# Altium footprint library PcbLib_IDC_Tester_v1.PcbLib: 13 footprints
Each footprint in its own frame and in the unit in brackets; x right, y up, seen from the top. Pads: shape width x height; smd on the part's side, far side on the other; paste and mask are expansions set on the pad; w line width, h text height; cw(c..) or ccw(c..) is an arc to the next point about the centre after c.
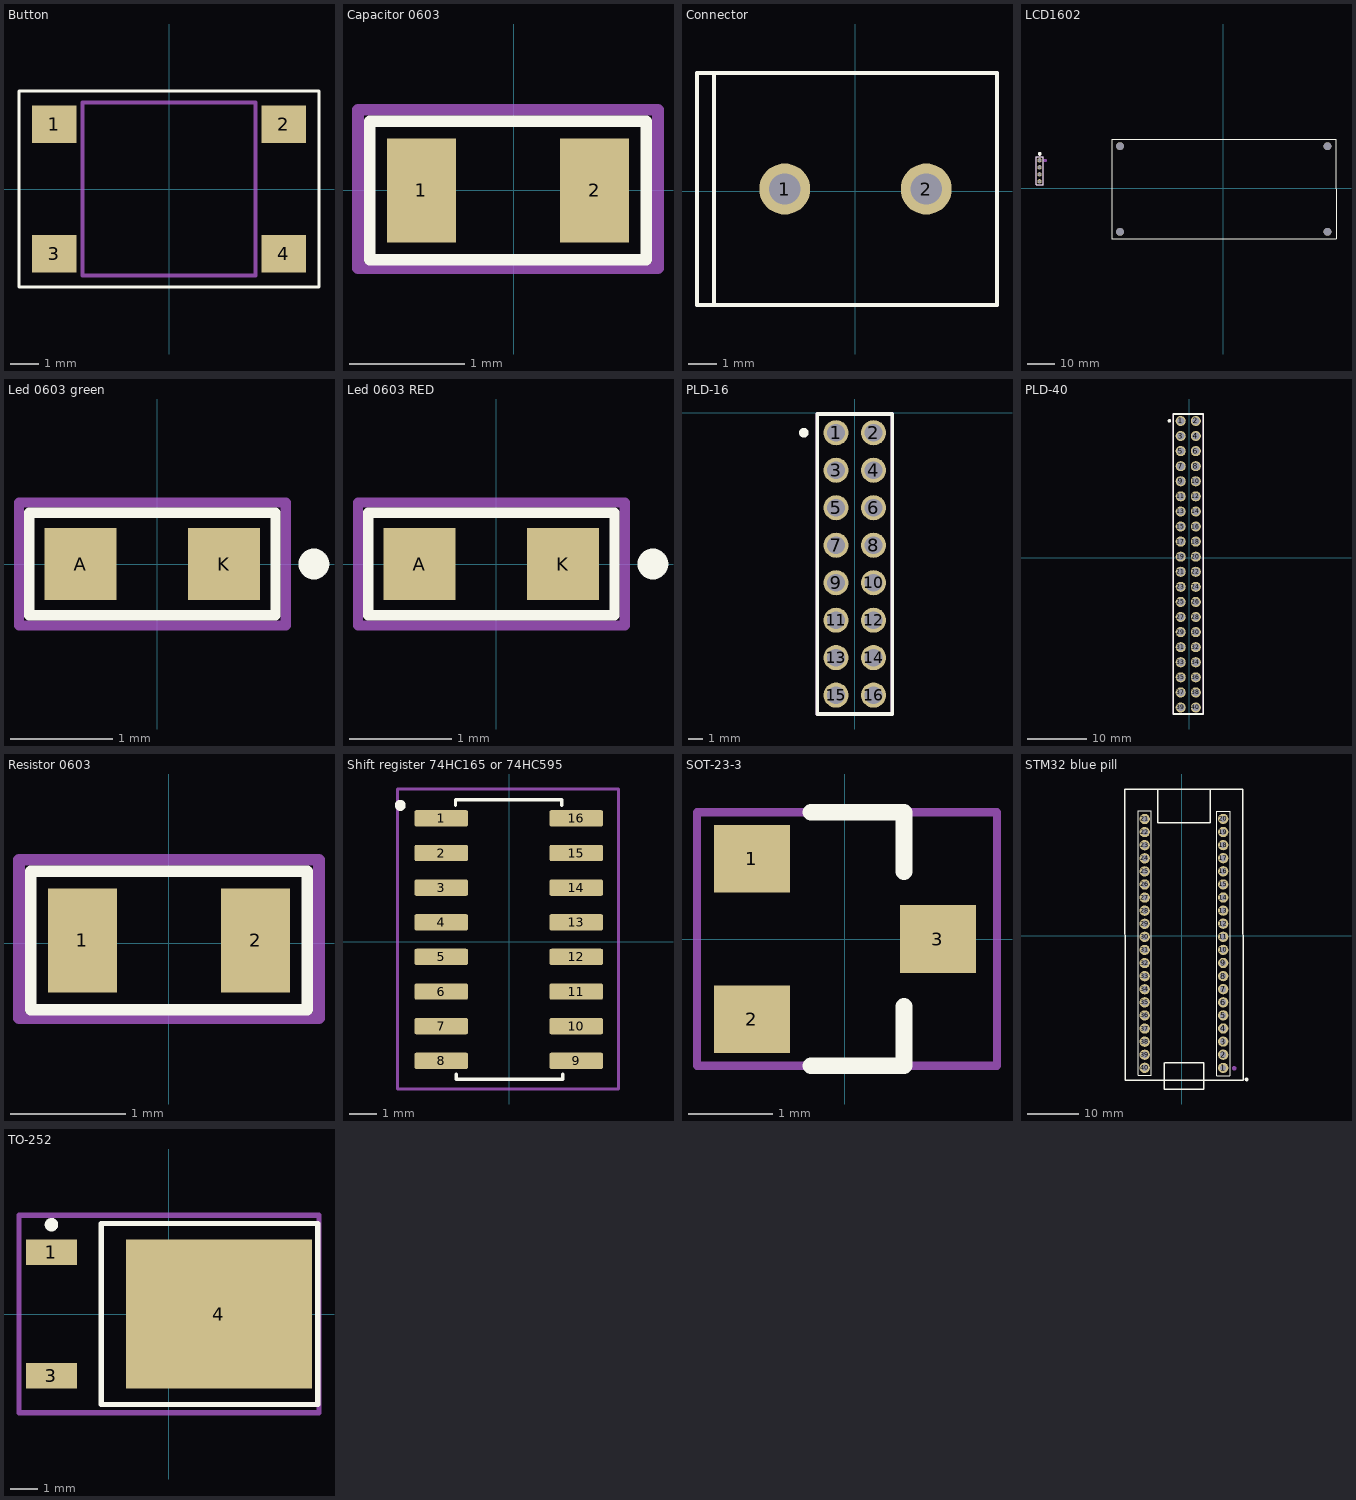
[diagram p0: the footprints below, top view; thin cyan lines are the x and y axes]

## Button [mm]
pads (4):
  rect 1.549x1.295 smd: 1(-3.975,2.25) 2(3.975,2.25) 3(-3.975,-2.25) 4(3.975,-2.25)
Top Overlay:
  lines w0.1: -5.2,-3.4 5.2,-3.4 5.2,3.4 -5.2,3.4 -5.2,-3.4
Mechanical 29:
  circle w0.3: c-4,2.3 r0.141
  lines w0.152: -2.997,-2.997 -2.997,2.997 2.997,2.997 2.997,-2.997 -2.997,-2.997
  text "'.Designator'" at 0.096,-1.327 h0.39
3D body "User Library-PTS645SL50SMTR92-LFS.STEP": height 5, standoff 0, extent -4.5,-3 4.5,3

## Capacitor 0603 [mm]
pads (2):
  rect 0.6x0.9 smd: 1(-0.8,0) 2(0.7,0)
Top Overlay:
  lines w0.1: -1.25,-0.6 -1.25,-0.2 -1.25,0.2 -1.25,0.6 -0.75,0.6 0.25,0.6 1.15,0.6 1.15,0.3 1.15,-0.3 1.15,-0.6 -1.25,-0.6
Mechanical 29:
  circle w0.2: c-0.8,0.025 r0.025
  lines w0.1: -1.35,-0.675 1.25,-0.675 1.25,0.7 -1.35,0.7 -1.35,-0.675
  text "'.Designator'" at -0.177,-0.046 h0.39
3D body "YAG_CC0603_YAG.step": height 0.91, standoff 0, extent -0.901,-0.45 0.801,0.464

## Connector [mm]
pads (2):
  round 1.8 hole 1.1: 1(-2.484,0.078) 2(2.516,0.078)
Top Overlay:
  lines w0.127: -4.984,-4.022 -5.584,-4.022 -5.584,4.178 -4.984,4.178 ; -4.984,-4.022 -4.984,4.178 ; -4.984,-4.022 5.016,-4.022 5.016,4.178 -4.984,4.178
Mechanical 29:
  circle w0.35: c-2.484,0.078 r0.1
  lines w0.127: -4.984,-4.022 -5.584,-4.022 -5.584,4.178 -4.984,4.178 ; -4.984,-4.022 -4.984,4.178 ; -4.984,-4.022 5.016,-4.022 5.016,4.178 -4.984,4.178
  text "'.Designator'" at -1.1,-0.033 h0.5
3D body "step_temp.STEP": height 10, standoff -3.5, extent -5.584,-4.022 5.016,4.178

## LCD1602 [mm]
pads (8):
  round 1.6 hole 1.2: 1(-66.5,10) 2(-66.5,7.46) 3(-66.5,4.92) 4(-66.5,2.38)
  round 2.8 hole 2.8 unplated: ""(-37.398,-15.857) ""(-37.398,15.143) ""(37.602,-15.857) ""(37.602,15.143)
Top Overlay:
  circle w0.8: c-66.425,12.34 r0.3
  lines w0.127: -40.4,-18.357 40.7,-18.357 40.7,17.643 -40.4,17.643 -40.4,-18.357
  lines w0.15: -67.77,1.11 -65.23,1.11 -65.23,11.27 -67.77,11.27 -67.77,1.11
Mechanical 1:
  lines w0.15: -67.77,1.11 -67.77,11.27 -65.23,11.27 -65.23,1.11 -67.77,1.11
Mechanical 29:
  circle w0.6: c-64.425,9.94 r0.3
  text "'.Designator'" at -6.2,-0.734 h2
3D body "PLS-1.STEP": height 8.5, standoff -3, extent -67.77,6.19 -65.23,8.73
3D body "PLS-1.STEP": height 8.5, standoff -3, extent -67.77,3.65 -65.23,6.19
3D body "PLS-1.STEP": height 8.5, standoff -3, extent -67.77,1.11 -65.23,3.65
3D body "PLS-1.STEP": height 8.5, standoff -3, extent -67.77,8.73 -65.23,11.27
3D body "PLS-1.STEP": height 8.5, standoff -3, extent -67.77,6.19 -65.23,8.73
3D body "PLS-1.STEP": height 8.5, standoff -3, extent -67.77,3.65 -65.23,6.19
3D body "PLS-1.STEP": height 8.5, standoff -3, extent -67.77,1.11 -65.23,3.65
3D body "PLS-1.STEP": height 8.5, standoff -3, extent -67.77,8.73 -65.23,11.27
3D body "M3_M_TO_F_10MM_STANDOFF.STEP": height 10, standoff -6, extent 34.715,-18.357 40.489,-13.357
3D body "M3_M_TO_F_10MM_STANDOFF.STEP": height 10, standoff -6, extent 34.715,12.643 40.489,17.643
3D body "M3_M_TO_F_10MM_STANDOFF.STEP": height 10, standoff -6, extent -40.285,-18.357 -34.511,-13.357
3D body "M3_M_TO_F_10MM_STANDOFF.STEP": height 10, standoff -6, extent -40.285,12.643 -34.511,17.643
3D body "LCD AP214.STEP": height 19.8, standoff -2.83, extent -39.9,-18.375 40.1,17.625

## Led 0603 green [mm]
pads (2):
  rect 0.7x0.7 smd: A(-0.75,0) K(0.65,0)
Top Overlay:
  circle w0.2: c1.525,0 r0.05
  lines w0.1: -1.25,-0.5 -0.45,-0.5 0.35,-0.5 1.15,-0.5 1.15,-0.25 1.15,0.25 1.15,0.5 0.35,0.5 -0.45,0.5 -1.25,0.5 -1.25,0.25 -1.25,-0.25 -1.25,-0.5
Mechanical 29:
  circle w0.2: c0.7,0 r0.1
  lines w0.1: -1.35,-0.6 -1.35,0.6 1.25,0.6 1.25,-0.6 -1.35,-0.6
  text "'.Designator'" at -0.727,0.004 h0.39
3D body "LED 0603 Base GREEN.STEP": height 0.29, standoff 0.01, extent -0.85,-0.4 0.75,0.4

## Led 0603 RED [mm]
pads (2):
  rect 0.7x0.7 smd: A(-0.75,0) K(0.65,0)
Top Overlay:
  circle w0.2: c1.525,0 r0.05
  lines w0.1: -1.25,-0.5 -1.25,-0.25 -1.25,0.25 -1.25,0.5 -0.45,0.5 0.35,0.5 1.15,0.5 1.15,0.25 1.15,-0.25 1.15,-0.5 0.35,-0.5 -0.45,-0.5 -1.25,-0.5
Mechanical 29:
  circle w0.2: c0.7,0 r0.1
  lines w0.1: -1.35,-0.6 1.25,-0.6 1.25,0.6 -1.35,0.6 -1.35,-0.6
  text "'.Designator'" at -0.727,0.004 h0.39
3D body "APG1608.STEP": height 0.2, standoff -0.05, extent -0.85,-0.4 0.75,0.4

## PLD-16 [mm]
pads (16):
  round 1.7 hole 1.2: 1(-1.27,-1.37) 2(1.27,-1.37) 3(-1.27,-3.91) 4(1.27,-3.91) 5(-1.27,-6.45) 6(1.27,-6.45) 7(-1.27,-8.99) 8(1.27,-8.99) 9(-1.27,-11.53) 10(1.27,-11.53) 11(-1.27,-14.07) 12(1.27,-14.07) 13(-1.27,-16.61) 14(1.27,-16.61) 15(-1.27,-19.15) 16(1.27,-19.15)
Top Overlay:
  circle w0.35: c-3.45,-1.375 r0.146
  lines w0.254: -2.54,-20.425 -2.54,-0.1 2.54,-0.1 2.54,-20.425 -2.54,-20.425
Mechanical 29:
  circle w0.35: c-1.27,-1.37 r0.135
  lines w0.254: -2.54,-20.425 -2.54,-0.1 2.54,-0.1 2.54,-20.425 -2.54,-20.425
  text "'.Designator''" at 0.346,-11.827 h0.39
3D body "User Library-PLD-16.step": height 8.61, standoff -2.99, extent -2.475,-20.435 2.525,-0.115

## PLD-40 [mm]
pads (40):
  round 1.7 hole 1.2: 1(-1.47,23.03) 2(1.07,23.03) 3(-1.47,20.49) 4(1.07,20.49) 5(-1.47,17.95) 6(1.07,17.95) 7(-1.47,15.41) 8(1.07,15.41) 9(-1.47,12.87) 10(1.07,12.87) 11(-1.47,10.33) 12(1.07,10.33) 13(-1.47,7.79) 14(1.07,7.79) 15(-1.47,5.25) 16(1.07,5.25) 17(-1.47,2.71) 18(1.07,2.71) 19(-1.47,0.17) 20(1.07,0.17) 21(-1.47,-2.37) 22(1.07,-2.37) 23(-1.47,-4.91) 24(1.07,-4.91) 25(-1.47,-7.45) 26(1.07,-7.45) 27(-1.47,-9.99) 28(1.07,-9.99) 29(-1.47,-12.53) 30(1.07,-12.53) 31(-1.47,-15.07) 32(1.07,-15.07) 33(-1.47,-17.61) 34(1.07,-17.61) 35(-1.47,-20.15) 36(1.07,-20.15) 37(-1.47,-22.69) 38(1.07,-22.69) 39(-1.47,-25.23) 40(1.07,-25.23)
Top Overlay:
  circle w0.35: c-3.375,23.05 r0.125
  lines w0.254: -2.74,24.125 -2.74,-26.325 2.34,-26.325 2.34,24.125 ; -2.74,24.2 -1.47,24.2 1.07,24.2 2.34,24.2
Mechanical 29:
  circle w0.35: c-1.47,23.03 r0.125
  lines w0.254: -2.74,24.125 -2.74,-26.325 -1.474,-26.325 1.059,-26.325 2.325,-26.325 ; -2.74,24.2 -1.47,24.2 1.07,24.2 2.34,24.2 2.34,-26.325
  text "'.Designator'" at 0.317,-3.375 h0.7
3D body "User Library-PLD-40.step": height 8.55, standoff -2.95, extent -2.74,-26.46 2.34,24.34

## Resistor 0603 [mm]
pads (2):
  rect 0.6x0.9 smd: 1(-0.75,0.025) 2(0.75,0.025)
Top Overlay:
  lines w0.1: -1.2,-0.575 -0.4,-0.575 0.4,-0.575 1.2,-0.575 1.2,-0.3 1.2,0.3 1.2,0.625 -1.2,0.625 -1.2,-0.575
Mechanical 29:
  circle w0.2: c-0.75,0.05 r0.025
  lines w0.1: -1.3,-0.65 1.3,-0.65 1.3,0.725 -1.3,0.725 -1.3,-0.65
  text "'.Designator'" at -0.127,-0.021 h0.39
3D body "crg0603f10r.stp": height 0.46, standoff 0.01, extent -0.8,-0.375 0.8,0.425

## Shift register 74HC165 or 74HC595 [mm]
pads (16):
  rrect25% 1.97x0.6 smd: 1(-2.496,4.523) 2(-2.496,3.253) 3(-2.496,1.983) 4(-2.496,0.713) 5(-2.496,-0.557) 6(-2.496,-1.827) 7(-2.496,-3.097) 8(-2.496,-4.367) 9(2.454,-4.367) 10(2.454,-3.097) 11(2.454,-1.827) 12(2.454,-0.557) 13(2.454,0.713) 14(2.454,1.983) 15(2.454,3.253) 16(2.454,4.523)
Top Overlay:
  circle w0.2: c-4,5 r0.1
  lines w0.127: -1.975,5 -1.975,5.2 1.925,5.2 1.925,5 ; -1.95,-4.85 -1.95,-5.05 1.95,-5.05 1.95,-4.85
Mechanical 29:
  circle w0.3: c-2.6,4.5 r0.1
  lines w0.1: -4.1,-5.4 -4.1,5.6 4,5.6 4,-5.4 -4.1,-5.4
  text "'.Designator'" at 0.247,-2.08 h0.7
3D body "D0016A.stp": height 1.75, standoff 0, extent -3.034,-4.872 2.992,5.028

## SOT-23-3 [mm]
height 1
pads (3):
  rect 0.9x0.8 smd: 1(-1.1,0.95) 2(-1.1,-0.95) 3(1.1,0)
Top Overlay:
  lines w0.2: -0.4,-1.5 0.7,-1.5 0.7,-0.8 ; -0.4,1.5 0.7,1.5 0.7,0.8
Mechanical 29:
  circle w0.3: c-1.1,0.975 r0.05
  lines w0.1: -1.75,-1.5 1.8,-1.5 1.8,1.5 -1.75,1.5 -1.75,-1.5
  text "'.Designator'" at -0.35,1.275 h0.7
3D body "SOT-23-3.step": height 1.3, standoff 0, extent -1.4,-1.45 1.4,1.45

## STM32 blue pill [mm]
pads (40):
  round 2 hole 1.2: 1(8.035,-25.663) 2(8.035,-23.098) 3(8.035,-20.558) 4(8.035,-18.018) 5(8.035,-15.478) 6(8.035,-12.938) 7(8.035,-10.398) 8(8.035,-7.858) 9(8.035,-5.318) 10(8.035,-2.778) 11(8.035,-0.238) 12(8.035,2.302) 13(8.035,4.842) 14(8.035,7.382) 15(8.035,9.922) 16(8.035,12.462) 17(8.035,15.002) 18(8.035,17.542) 19(8.035,20.082) 20(8.035,22.622) 21(-7.179,22.611) 22(-7.179,20.071) 23(-7.179,17.531) 24(-7.179,14.991) 25(-7.179,12.451) 26(-7.179,9.911) 27(-7.179,7.371) 28(-7.179,4.831) 29(-7.179,2.291) 30(-7.179,-0.249) 31(-7.179,-2.789) 32(-7.179,-5.329) 33(-7.179,-7.869) 34(-7.179,-10.409) 35(-7.179,-12.949) 36(-7.179,-15.489) 37(-7.179,-18.029) 38(-7.179,-20.569) 39(-7.179,-23.109) 40(-7.179,-25.649)
Top Overlay:
  circle w0.5: c12.575,-27.9 r0.103
  lines w0.1: -8.45,-27.125 -8.45,24.2 -5.925,24.2 -5.925,-27.125 -8.45,-27.125 ; 6.775,-27.175 6.775,24.125 9.3,24.125 9.3,-27.175 6.775,-27.175
  lines w0.254: -10.964,-28.051 11.901,-28.099 ; -10.951,-28.064 -11.016,28.425 11.845,28.425 11.896,-28.064 ; -3.369,-24.673 -3.369,-29.753 4.251,-29.753 4.251,-24.673 -3.242,-24.673 ; -3.349,-24.673 -3.349,-29.753 1.985,-29.753 ; -3.222,-24.673 2.112,-24.673 ; 5.495,28.325 5.495,21.898 -4.665,21.898 ; -4.665,21.898 -4.675,28.35 -4.665,21.898
Mechanical 29:
  circle w0.5: c10.175,-25.75 r0.182
  text "'.Designator'" at 0,-2.925 h1.5
3D body "User Library-PBS_(DS1023)_1line_connectors_h=5_0_8_5mm_step_2_54mm-1.step": height 8.51, standoff -2.99, extent 6.8,-27.125 9.3,24.175
3D body "User Library-PBS_(DS1023)_1line_connectors_h=5_0_8_5mm_step_2_54mm-1.step": height 8.51, standoff -2.99, extent -8.429,-27.124 -5.929,24.176
3D body "STM32.step": height 20.77, standoff 2.5, extent -10.985,-29 11.875,28.56

## TO-252 [mm]
pads (3):
  rect 1.9x0.95 smd: 1(-4.35,2.28) 3(-4.35,-2.28)
  rect 6.9x5.5 smd: 4(1.85,0)
Top Overlay:
  circle w0.25: c-4.35,3.305 r0.125
  lines w0.2: 5.5,-3.35 -2,-3.35 -2.5,-3.35 -2.5,3.35 -2,3.35 5.5,3.35 5.5,1.7 5.5,-1.65 5.5,-3.325
Mechanical 29:
  circle w0.5: c-4.4,2.3 r0.1
  lines w0.2: -5.55,-3.65 5.55,-3.65 5.55,3.65 -5.55,3.65 -5.55,-3.65
  text "'.Designator'" at 0.275,-0.475 h0.6
3D body "User Library-TO-252-3.STEP": height 2.41, standoff 0, extent -5.101,-3.35 5.251,3.35